# Altium schematic symbol library WE-SLSP.SchLib: 7 symbols
Pins are listed as number, name and electrical type; pins without a type are passive.

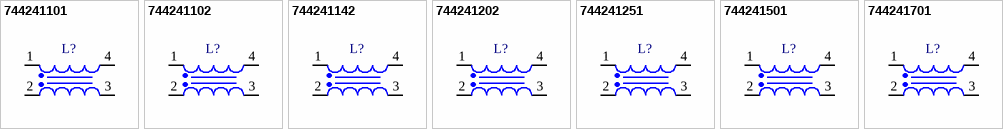
[diagram p0: symbols 744241101 to 744241701]

## 744241101
designator L?, comment 0.27uH  (value not drawn)
WE-SLSP Common Mode Choke Line Slim Profile, SMT, 0.27uH, 6A, 15mohm; Manufacturer Part Number: 744241101; Manufacturer: Wurth Elektronik; Impedance @10MHz: 15omh; Impedance @100MHz: 100omh; Impedance Max: 150omh; Rated Voltage: 100V (DC); Product Series: WE-SLSP; ComponentLink1Description: Website Link; ComponentLink1URL: https://www.we-online.com; ComponentLink2Description: Datasheet Link; ComponentLink2URL: https://www.we-online.com/components/products/datasheet/744241101; Mount: Surface Mount; Operating Temperature Min: -40degC; Operating Temperature Max: 125degC; Packaging: Tape and Reel; Length: 5mm; Width: 5mm; Height: 2.5mm; DC Resistance Max: 15mohm; Inductance: 0.27uH; Rated Current: 6A
footprint WE-SLSP_L5W5H2.5
pins: 1, 2, 3, 4

## 744241102
designator L?, comment 1.85uH  (value not drawn)
WE-SLSP Common Mode Choke Line Slim Profile, SMT, 1.85uH, 2A, 45mohm; Manufacturer Part Number: 744241102; Manufacturer: Wurth Elektronik; Impedance @10MHz: 130omh; Impedance @100MHz: 1000omh; Rated Voltage: 100V (DC); Product Series: WE-SLSP; ComponentLink1Description: Website Link; ComponentLink1URL: https://www.we-online.com; ComponentLink2Description: Datasheet Link; ComponentLink2URL: https://www.we-online.com/components/products/datasheet/744241102; Mount: Surface Mount; Operating Temperature Min: -40degC; Operating Temperature Max: 125degC; Packaging: Tape and Reel; Length: 5mm; Width: 5mm; Height: 2.5mm; DC Resistance Max: 45mohm; Impedance Max: 1000omh; Inductance: 1.85uH; Rated Current: 2A
footprint WE-SLSP_L5W5H2.5
pins: 1, 2, 3, 4

## 744241142
designator L?, comment 2.6uH  (value not drawn)
WE-SLSP Common Mode Choke Line Slim Profile, SMT, 2.6uH, 1.5A, 55mohm; Manufacturer Part Number: 744241142; Manufacturer: Wurth Elektronik; Impedance @10MHz: 200omh; Impedance @100MHz: 1400omh; Impedance Max: 1500omh; Rated Voltage: 100V (DC); Product Series: WE-SLSP; ComponentLink1Description: Website Link; ComponentLink1URL: https://www.we-online.com; ComponentLink2Description: Datasheet Link; ComponentLink2URL: https://www.we-online.com/components/products/datasheet/744241142; Mount: Surface Mount; Operating Temperature Min: -40degC; Operating Temperature Max: 125degC; Packaging: Tape and Reel; Length: 5mm; Width: 5mm; Height: 2.5mm; DC Resistance Max: 55mohm; Inductance: 2.6uH; Rated Current: 1.5A
footprint WE-SLSP_L5W5H2.5
pins: 1, 2, 3, 4

## 744241202
designator L?, comment 3.6uH  (value not drawn)
WE-SLSP Common Mode Choke Line Slim Profile, SMT, 3.6uH, 1.3A, 73mohm; Manufacturer Part Number: 744241202; Manufacturer: Wurth Elektronik; Impedance @10MHz: 230omh; Impedance @100MHz: 1800omh; Impedance Max: 2050omh; Rated Voltage: 100V (DC); Product Series: WE-SLSP; ComponentLink1Description: Website Link; ComponentLink1URL: https://www.we-online.com; ComponentLink2Description: Datasheet Link; ComponentLink2URL: https://www.we-online.com/components/products/datasheet/744241202; Mount: Surface Mount; Operating Temperature Min: -40degC; Operating Temperature Max: 125degC; Packaging: Tape and Reel; Length: 5mm; Width: 5mm; Height: 2.5mm; DC Resistance Max: 73mohm; Inductance: 3.6uH; Rated Current: 1.3A
footprint WE-SLSP_L5W5H2.5
pins: 1, 2, 3, 4

## 744241251
designator L?, comment 0.55uH  (value not drawn)
WE-SLSP Common Mode Choke Line Slim Profile, SMT, 0.55uH, 5A, 20mohm; Manufacturer Part Number: 744241251; Manufacturer: Wurth Elektronik; Impedance @10MHz: 40omh; Impedance @100MHz: 250omh; Impedance Max: 350omh; Rated Voltage: 100V (DC); Product Series: WE-SLSP; ComponentLink1Description: Website Link; ComponentLink1URL: https://www.we-online.com; ComponentLink2Description: Datasheet Link; ComponentLink2URL: https://www.we-online.com/components/products/datasheet/744241251; Mount: Surface Mount; Operating Temperature Min: -40degC; Operating Temperature Max: 125degC; Packaging: Tape and Reel; Length: 5mm; Width: 5mm; Height: 2.5mm; DC Resistance Max: 20mohm; Inductance: 0.55uH; Rated Current: 5A
footprint WE-SLSP_L5W5H2.5
pins: 1, 2, 3, 4

## 744241501
designator L?, comment 0.96uH  (value not drawn)
WE-SLSP Common Mode Choke Line Slim Profile, SMT, 0.96uH, 4A, 30mohm; Manufacturer Part Number: 744241501; Manufacturer: Wurth Elektronik; Impedance @10MHz: 65omh; Impedance @100MHz: 530omh; Impedance Max: 600omh; Rated Voltage: 100V (DC); Product Series: WE-SLSP; ComponentLink1Description: Website Link; ComponentLink1URL: https://www.we-online.com; ComponentLink2Description: Datasheet Link; ComponentLink2URL: https://www.we-online.com/components/products/datasheet/744241501; Mount: Surface Mount; Operating Temperature Min: -40degC; Operating Temperature Max: 125degC; Packaging: Tape and Reel; Length: 5mm; Width: 5mm; Height: 2.5mm; DC Resistance Max: 30mohm; Inductance: 0.96uH; Rated Current: 4A
footprint WE-SLSP_L5W5H2.5
pins: 1, 2, 3, 4

## 744241701
designator L?, comment 1.8uH  (value not drawn)
WE-SLSP Common Mode Choke Line Slim Profile, SMT, 1.8uH, 3.5A, 35mohm; Manufacturer Part Number: 744241701; Manufacturer: Wurth Elektronik; Impedance @10MHz: 90omh; Impedance @100MHz: 1000omh; Rated Voltage: 100V (DC); Product Series: WE-SLSP; ComponentLink1Description: Website Link; ComponentLink1URL: https://www.we-online.com; ComponentLink2Description: Datasheet Link; ComponentLink2URL: https://www.we-online.com/components/products/datasheet/744241701; Mount: Surface Mount; Operating Temperature Min: -40degC; Operating Temperature Max: 125degC; Packaging: Tape and Reel; Length: 5mm; Width: 5mm; Height: 2.5mm; DC Resistance Max: 35mohm; Impedance Max: 1000omh; Inductance: 1.8uH; Rated Current: 3.5A
footprint WE-SLSP_L5W5H2.5
pins: 1, 2, 3, 4